# Altium footprint library Passive-Ind.PcbLib: 61 footprints (part 4 of 4)
Each footprint in its own frame and in the unit in brackets; x right, y up, seen from the top. Pads: shape width x height; smd on the part's side, far side on the other; paste and mask are expansions set on the pad; w line width, h text height; cw(c..) or ccw(c..) is an arc to the next point about the centre after c.
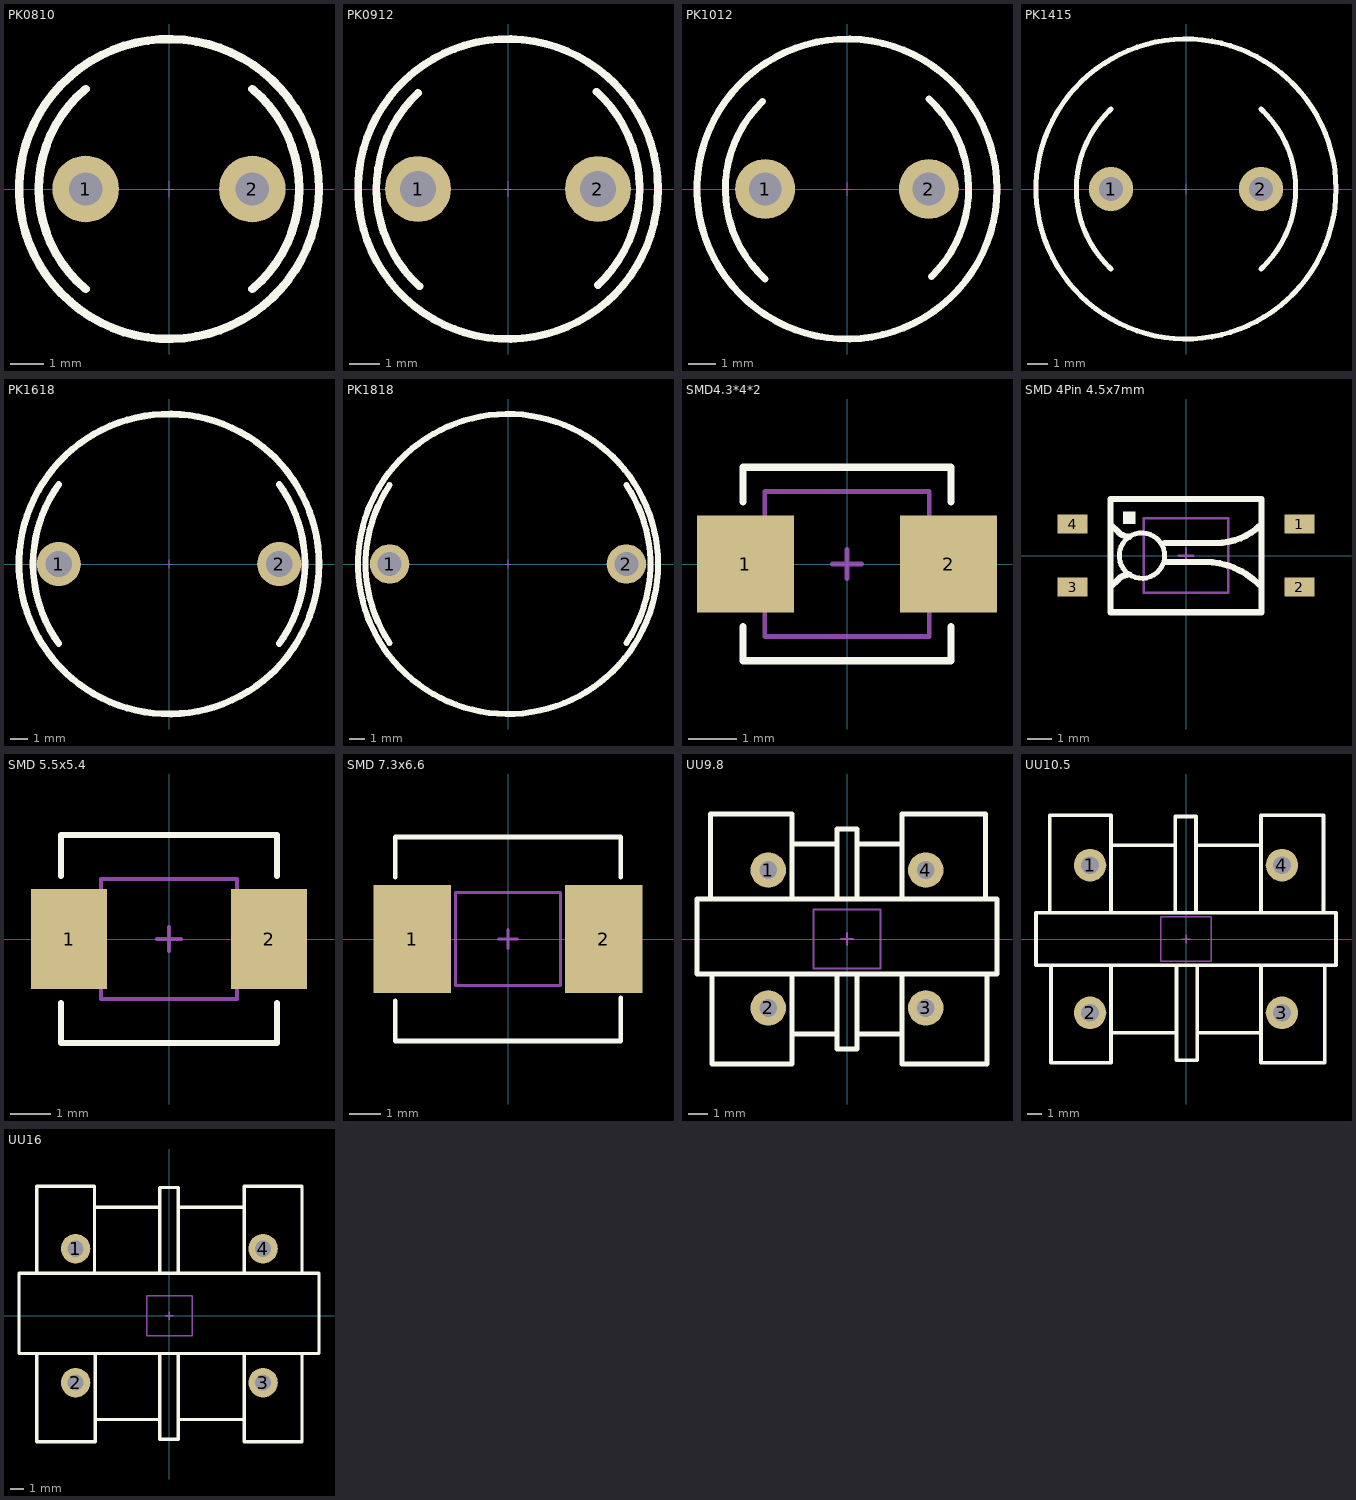
[diagram p3: the footprints below, top view; thin cyan lines are the x and y axes]

## PK0810 [mm] "5*9*12mm(脚距，直径，高）"
pads (2):
  round 2 hole 1: 1(-2.5,0) 2(2.5,0)
Top Overlay:
  circle w0.254: c0,0 r4.5
  lines w0.254: -2.5,-3 cw(c0,0) -2.5,3 ; 2.5,-3 ccw(c0,0) 2.5,3
Top Designator:
  text ".Designator" at 7.618,-0.508 h1.52
Bottom Courtyard:
  lines w0.01: -0.127,0 0.127,0 ; 0,-0.254 0,0.254
3D body "PK0810.STEP": height 12.02, standoff -2.78, extent -4.5,-4.555 4.5,4.445

## PK0912 [mm] "6*10*14mm(脚距，直径，高）"
pads (2):
  round 2.2 hole 1.2: 1(-3,0) 2(3,0)
Top Overlay:
  circle w0.254: c0,0 r5
  lines w0.254: -3,3.2 ccw(c0,0) -2.951,-3.246 ; 2.951,3.246 cw(c0,0) 3,-3.2
Top Designator:
  text ".Designator" at 7.618,-0.508 h1.52
Bottom Courtyard:
  lines w0.01: -0.127,0 0.127,0 ; 0,-0.254 0,0.254
3D body "PK0912.STEP": height 14.02, standoff -2.78, extent -5,-4.92 5,5.08

## PK1012 [mm] "6*11*14mm(脚距，直径，高）"
pads (2):
  round 2.2 hole 1.2: 1(-3,0) 2(3,0)
Top Overlay:
  circle w0.254: c0,0 r5.5
  lines w0.254: -3.101,3.205 ccw(c0,0) -3,-3.3 ; 3,3.3 cw(c0,0) 3.101,-3.205
Top Designator:
  text ".Designator" at 7.618,-0.508 h1.52
Bottom Courtyard:
  lines w0.01: -0.127,0 0.127,0 ; 0,-0.254 0,0.254
3D body "PK1012.STEP": height 14.02, standoff -2.78, extent -5.5,-5.412 5.5,5.588

## PK1415 [mm] "7.5*15*17mm(脚距，直径，高）"
pads (2):
  round 2.2 hole 1.2: 1(-3.75,0) 2(3.75,0)
Top Overlay:
  circle w0.254: c0,0 r7.5
  lines w0.254: -3.75,-4 cw(c0,0) -3.75,4 ; 3.75,-4 ccw(c0,0) 3.75,4
Top Designator:
  text ".Designator" at 7.618,-0.508 h1.52
Bottom Courtyard:
  lines w0.01: -0.127,0 0.127,0 ; 0,-0.254 0,0.254
3D body "PK1415.STEP": height 17.02, standoff -2.78, extent -7.493,-7.5 7.507,7.5

## PK1618 [mm] "12.5*17*20mm(脚距，直径，高）"
pads (2):
  round 2.5 hole 1.5: 1(-6.25,0) 2(6.25,0)
Top Overlay:
  circle w0.381: c0,0 r8.5
  lines w0.381: -6.25,-4.5 cw(c0,0) -6.25,4.5 ; 6.25,-4.5 ccw(c0,0) 6.25,4.5
Top Designator:
  text ".Designator" at 7.618,-0.508 h1.52
Bottom Courtyard:
  lines w0.01: -0.127,0 0.127,0 ; 0,-0.254 0,0.254
3D body "PK1618.STEP": height 20.02, standoff -2.78, extent -8.5,-8.382 8.5,8.618

## PK1818 [mm] "15*19*20mm(脚距，直径，高）"
pads (2):
  round 2.5 hole 1.5: 1(-7.5,0) 2(7.5,0)
Top Overlay:
  circle w0.381: c0,0 r9.5
  lines w0.381: -7.5,-5 cw(c0,0) -7.5,5 ; 7.5,-5 ccw(c0,0) 7.5,5
Top Designator:
  text ".Designator" at 7.618,-0.508 h1.52
Bottom Courtyard:
  lines w0.01: -0.127,0 0.127,0 ; 0,-0.254 0,0.254
3D body "PK1818.STEP": height 20.03, standoff -2.77, extent -9.525,-9.373 9.475,9.627

## SMD4.3*4*2 [mm]
pads (2):
  rect 2x2 smd: 1(-2.1,0) 2(2.1,0)
Top Overlay:
  lines w0.152: -2.15,-1.297 -2.15,-2 2.15,-2 2.15,-1.297 ; -2.15,1.28 -2.15,2 2.15,2 2.15,1.28
Top Component Outline:
  lines w0.1: -1.7,-1.5 1.7,-1.5 1.7,1.5 -1.7,1.5 -1.7,-1.5
Top Component Center:
  lines w0.1: -0.3,0 0.3,0 ; 0,-0.3 0,0.3
Top Value:
  text "'.Comment'" at -2.754,-0.38 h1.27
Top Designator:
  text ".Designator" at -3.774,-0.319 h1.52
3D body: height 1.5, standoff 0, extent -2.172,-1.995 2.146,1.992

## SMD 4Pin 4.5x7mm [mm] "82175R-LF1 LAN0019-01"
pads (4):
  rect 1.2x0.76 smd: 1(4.572,1.27) 2(4.572,-1.27) 3(-4.572,-1.27) 4(-4.572,1.27)
Top Overlay:
  circle w0.2: c-1.778,0 r0.916
  rectangle: -2.54,1.27 -2.032,1.778
  lines w0.254: -3.048,-1.27 -2.72,-0.942 cw(c-2.286,-1.375) -2.286,-0.762 ; -3.048,1.27 -2.72,0.942 ccw(c-2.286,1.375) -2.286,0.762 ; -0.862,-0.254 0.762,-0.254 cw(c0.762,-3.32) 2.93,-1.152 ; -0.862,0.508 1.208,0.508 ccw(c1.208,3.11) 3.048,1.27 ; -3.048,-2.286 -3.048,2.286 3.048,2.286 3.048,-2.286 -3.048,-2.286
Top Component Outline:
  lines w0.1: -1.7,-1.5 1.7,-1.5 1.7,1.5 -1.7,1.5 -1.7,-1.5
Top Component Center:
  lines w0.1: -0.3,0 0.3,0 ; 0,-0.3 0,0.3
Top Value:
  text "'.Comment'" at -2.754,-0.38 h1.27
Top Designator:
  text ".Designator" at -3.774,-0.319 h1.52
3D body "User Library-LAN0019-01.step": height 2.2, standoff 0, extent -4.59,-2.195 4.59,2.195

## SMD 5.5x5.4 [mm]
height 1.8
pads (2):
  rect 1.9x2.5 smd: 1(-2.5,0) 2(2.5,0)
Top Overlay:
  lines w0.152: -2.7,-1.6 -2.7,-2.6 2.7,-2.6 2.7,-1.6 ; -2.7,1.58 -2.7,2.6 2.7,2.6 2.7,1.58
Top Component Outline:
  lines w0.1: -1.7,-1.5 -1.7,1.5 1.7,1.5 1.7,-1.5 -1.7,-1.5
Top Component Center:
  lines w0.1: -0.3,0 0.3,0 ; 0,-0.3 0,0.3
Top Value:
  text "'.Comment'" at -2.754,-0.38 h1.27
Top Designator:
  text ".Designator" at -3.774,-0.319 h1.52
3D body: height 1.5, standoff 0, extent -2.709,-2.6 2.7,2.6

## SMD 7.3x6.6 [mm]
height 3
pads (2):
  rect 2.5x3.5 smd: 1(-3.1,0) 2(3.1,0)
Top Overlay:
  lines w0.152: -3.65,-2 -3.65,-3.3 3.65,-3.3 3.65,-1.9 ; -3.65,2 -3.65,3.3 3.65,3.3 3.65,2
Top Component Outline:
  lines w0.1: -1.7,-1.5 1.7,-1.5 1.7,1.5 -1.7,1.5 -1.7,-1.5
Top Component Center:
  lines w0.1: -0.3,0 0.3,0 ; 0,-0.3 0,0.3
Top Value:
  text "'.Comment'" at -2.754,-0.38 h1.27
Top Designator:
  text ".Designator" at -3.774,-0.319 h1.52
3D body: height 3, standoff 0, extent -3.606,-3.3 3.606,3.3

## UU9.8 [mm] "17*12*17mm(长宽高）"
pads (4):
  round 1.8 hole 0.9: 1(-4,3.5) 2(-4,-3.5) 3(4,-3.5) 4(4,3.5)
Top Overlay:
  lines w0.254: -6.943,2.032 -6.943,6.35 -2.794,6.35 -2.794,2.032 ; -6.858,-1.778 -6.858,-6.35 -2.794,-6.35 -2.794,-1.778 ; -2.794,-4.826 -0.638,-4.826 ; -2.794,4.826 -0.508,4.826 ; -0.508,-1.778 -0.508,-5.588 0.508,-5.588 0.508,-1.778 ; -0.508,2.032 -0.508,5.588 0.508,5.588 0.508,2.032 ; 0.508,-4.826 2.794,-4.826 ; 0.508,4.826 2.794,4.826 ; 2.794,-1.778 2.794,-6.35 7.112,-6.35 7.112,-1.778 ; 2.794,2.032 2.794,6.35 7.027,6.35 7.027,2.032 ; -7.62,-1.778 -7.62,2.032 7.62,2.032 7.62,-1.778 -7.62,-1.778
Top Component Outline:
  lines w0.1: -1.7,-1.5 1.7,-1.5 1.7,1.5 -1.7,1.5 -1.7,-1.5
Top Component Center:
  lines w0.1: -0.3,0 0.3,0 ; 0,-0.3 0,0.3
Top Value:
  text "'.Comment'" at -2.754,-0.38 h1.27
Top Designator:
  text ".Designator" at -3.774,-0.319 h1.52
3D body "UU9.8.STEP": height 17.05, standoff -3.45, extent -8.491,-6 8.509,6

## UU10.5 [mm] "18*16*20mm(长宽高）"
pads (4):
  round 2.2 hole 1.2: 1(-6.5,5) 2(-6.5,-5) 3(6.5,-5) 4(6.5,5)
Top Overlay:
  lines w0.254: -9.229,1.904 -9.229,8.382 -5.08,8.382 -5.08,1.904 ; -9.144,-1.81 -9.144,-8.382 -5.08,-8.382 -5.08,-1.81 ; -5.08,-6.35 -0.638,-6.35 ; -5.08,6.35 -0.723,6.35 ; -0.723,1.904 -0.723,8.304 0.677,8.304 0.677,1.904 ; -0.638,-1.81 -0.638,-8.21 0.762,-8.21 0.762,-1.81 ; 0.677,6.35 5.08,6.35 ; 0.762,-6.35 5.08,-6.35 ; 5.08,-1.904 5.08,-8.382 9.398,-8.382 9.398,-1.904 ; 5.08,1.904 5.08,8.382 9.313,8.382 9.313,1.904 ; -10.16,-1.778 -10.16,1.778 10.16,1.778 10.16,-1.778 -10.16,-1.778
Top Component Outline:
  lines w0.1: -1.7,-1.5 1.7,-1.5 1.7,1.5 -1.7,1.5 -1.7,-1.5
Top Component Center:
  lines w0.1: -0.3,0 0.3,0 ; 0,-0.3 0,0.3
Top Value:
  text "'.Comment'" at -2.754,-0.38 h1.27
Top Designator:
  text ".Designator" at -3.774,-0.319 h1.52
3D body "UU10.5.STEP": height 21.05, standoff -3.45, extent -9.398,-8 9.402,8

## UU16 [mm] "22*17.5*23mm(长宽高）"
pads (4):
  round 2.2 hole 1.2: 1(-7,5) 2(-7,-5) 3(7,-5) 4(7,5)
Top Overlay:
  lines w0.254: -9.906,-2.826 -9.906,-9.398 -5.523,-9.398 -5.523,-2.826 ; -9.906,3.174 -9.906,9.652 -5.588,9.652 -5.588,3.174 ; -5.523,-7.749 -0.723,-7.749 ; -5.523,8.097 -0.723,8.097 ; -0.723,-2.826 -0.723,-9.226 0.677,-9.226 0.677,-2.826 ; -0.723,3.174 -0.723,9.574 0.677,9.574 0.677,3.174 ; 0.677,-7.749 5.477,-7.749 ; 0.677,8.097 5.477,8.097 ; 5.588,-2.92 5.588,-9.398 9.906,-9.398 9.906,-2.92 ; 5.588,3.174 5.588,9.652 9.906,9.652 9.906,3.174 ; -11.223,-2.826 11.177,-2.826 11.177,3.174 -11.223,3.174 -11.223,-2.826
Top Component Outline:
  lines w0.1: -1.7,-1.5 -1.7,1.5 1.7,1.5 1.7,-1.5 -1.7,-1.5
Top Component Center:
  lines w0.1: -0.3,0 0.3,0 ; 0,-0.3 0,0.3
Top Value:
  text "'.Comment'" at -2.754,-0.38 h1.27
Top Designator:
  text ".Designator" at -3.774,-0.319 h1.52
3D body "UU16.STEP": height 22.05, standoff -3.45, extent -11.049,-8.75 10.951,8.75